# Altium schematic symbol library Yalynka.SchLib: 4 symbols
Pins are listed as number, name and electrical type; pins without a type are passive.

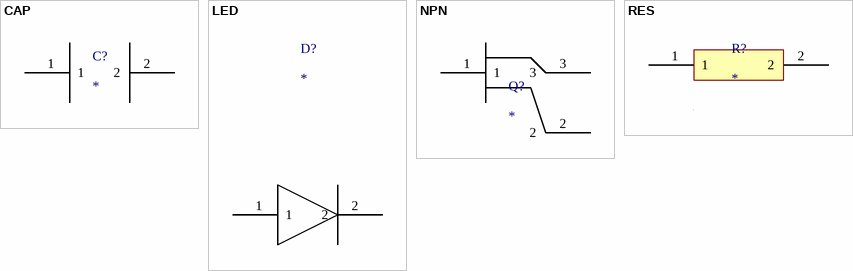
[diagram p0: symbols CAP to RES]

## CAP
designator C?
footprint CAP_1206
pins: 1, 2

## LED
designator D?
footprint LED_1206
pins: 1, 2

## NPN
designator Q?
footprint SOT23 (SOT23, 3-Leads, Body 2,90x2,45mm, Pitch 0,95mm, IPC Medium Density)
pins: 1, 2, 3

## RES
designator R?
footprint RES_1206 (Chip Capacitor, 2-Leads, Body 2,05x1,00mm, IPC Medium Density)
pins: 1, 2